# Altium footprint library Amin-Library.PcbLib: 601 footprints (part 24 of 38)
Each footprint in its own frame and in the unit in brackets; x right, y up, seen from the top. Pads: shape width x height; smd on the part's side, far side on the other; paste and mask are expansions set on the pad; w line width, h text height; cw(c..) or ccw(c..) is an arc to the next point about the centre after c.
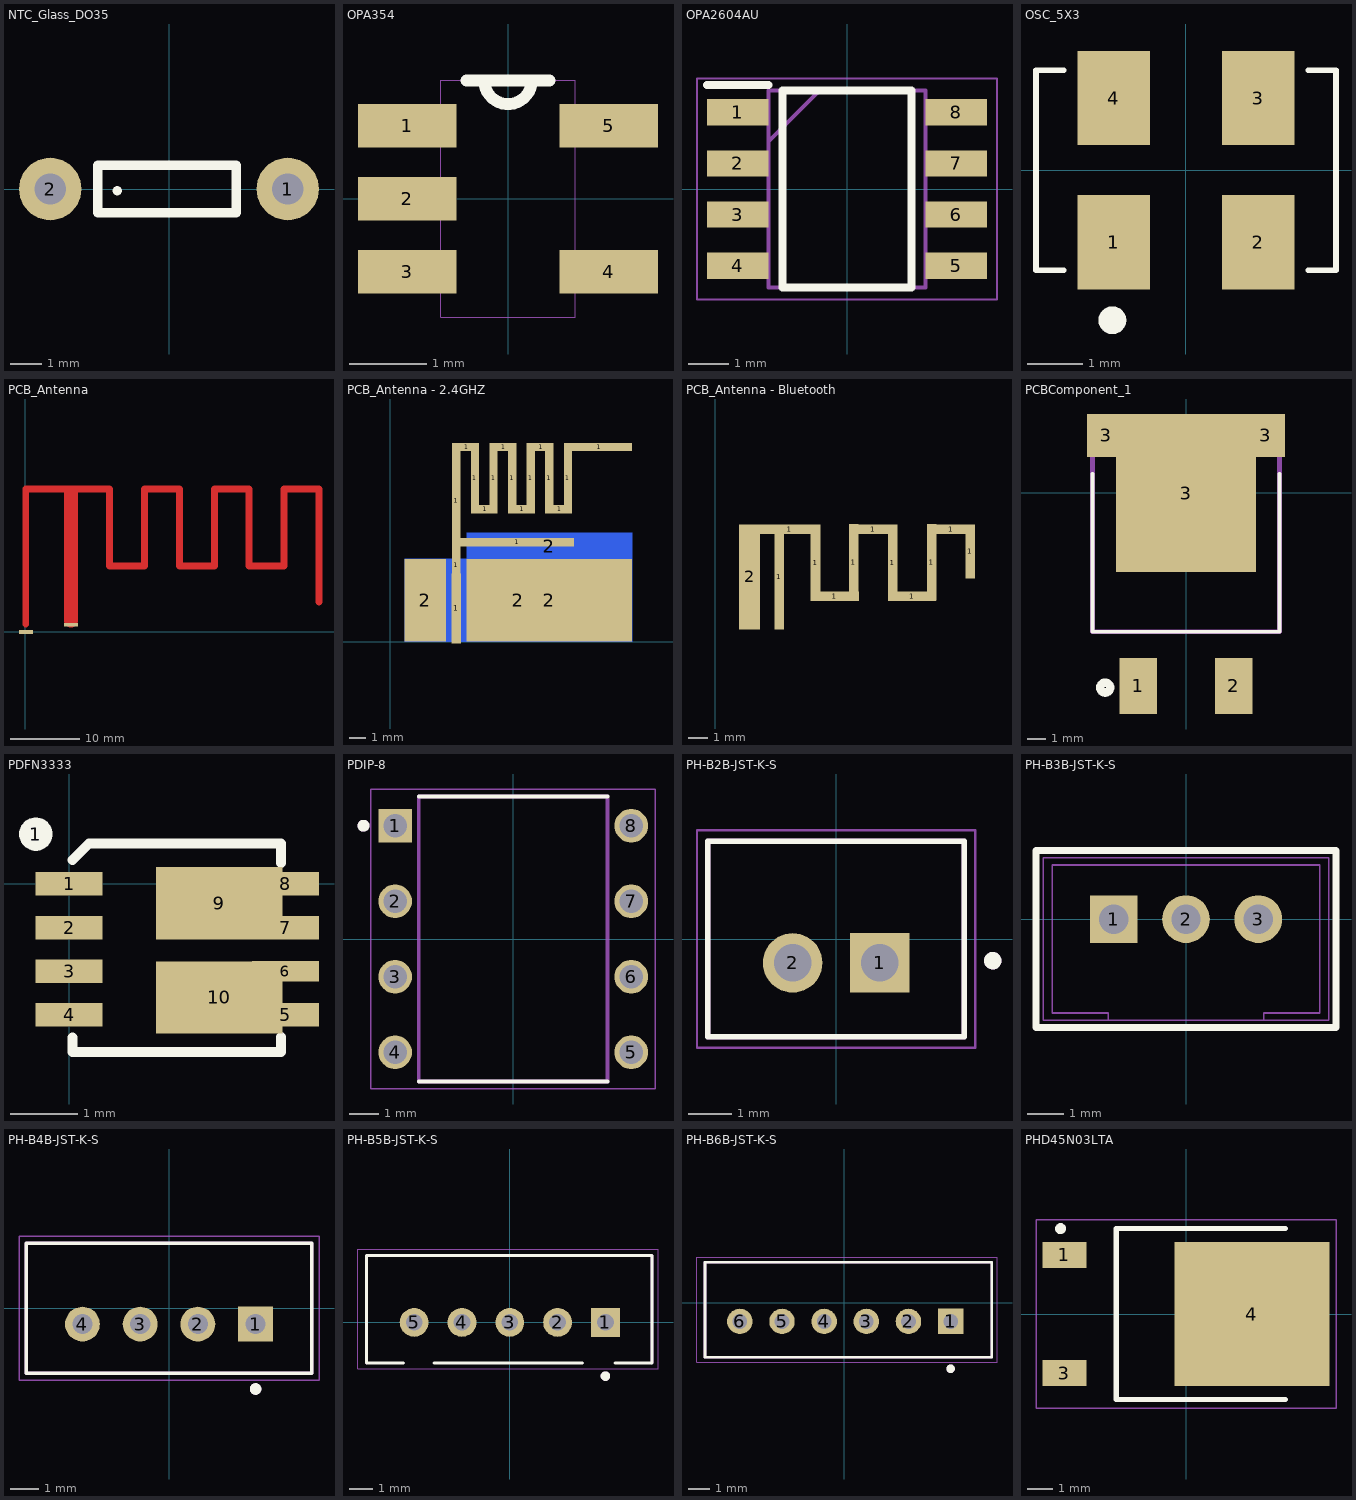
[diagram p23: the footprints below, top view; thin cyan lines are the x and y axes]

## NTC_Glass_DO35 [mm]
pads (2):
  round 2 hole 1: 1(3.8,0) 2(-3.8,0)
Top Overlay:
  lines w0.305: -2.286,-0.762 2.159,-0.762 2.159,0.762 -2.286,0.762 -2.286,-0.762 ; -1.651,-0.063 -1.651,-0.063
3D body "User Library-DO-35_300mils.STEP": height 2.46, standoff -2, extent -4.07,-1.016 4.07,0.89

## OPA354 [mil]
pads (5):
  rect 50x22 smd: 1(-51,37) 2(-51,0) 3(-51,-37) 4(51,-37) 5(51,37)
Top Overlay:
  lines w6: -21,60 -12,60 ; 21,60 12,60 ; -12,60 ccw(c0,60) 12,60 ; -12,60 12,60
Mechanical 4:
  lines w0: -59,-47 -34,-47 ; -59,-47 -59,-28 ; -59,-47 -34,-47 ; -59,-47 -59,-28 ; -59,-28 -34,-28 ; -59,-28 -34,-28 ; -59,-10 -34,-10 ; -59,-10 -59,10 ; -59,-10 -34,-10 ; -59,-10 -59,10 ; -59,10 -34,10 ; -59,10 -34,10 ; -59,28 -34,28 ; -59,28 -59,47 ; -59,28 -34,28 ; -59,28 -59,47 ; -59,47 -34,47 ; -59,47 -34,47 ; -34,-60 -34,-47 ; -34,-60 34,-60 ; -34,-60 -34,-47 ; -34,-60 34,-60 ; -34,-47 -34,-28 ; -34,-47 -34,-28 ; -34,-28 -34,-10 ; -34,-28 -34,-10 ; -34,-10 -34,10 ; -34,-10 -34,10 ; -34,10 -34,28 ; -34,10 -34,28 ; -34,28 -34,47 ; -34,28 -34,47 ; -34,47 -34,60 ; -34,47 -34,60 ; -34,60 -12,60 ; -34,60 -12,60 ; -12,60 ccw(c0,60) 12,60 ; -12,60 ccw(c0,60) 12,60 ; -12,60 12,60 ; -12,60 12,60 ; 12,60 34,60 ; 12,60 34,60 ; 34,-60 34,-47 ; 34,-60 34,-47 ; 34,-47 59,-47 ; 34,-47 34,-28 ; 34,-47 59,-47 ; 34,-47 34,-28 ; 34,-28 59,-28 ; 34,-28 34,28 ; 34,-28 59,-28 ; 34,-28 34,28 ; 34,28 59,28 ; 34,28 34,47 ; 34,28 59,28 ; 34,28 34,47 ; 34,47 59,47 ; 34,47 34,60 ; 34,47 59,47 ; 34,47 34,60 ; 59,-47 59,-28 ; 59,-47 59,-28 ; 59,28 59,47 ; 59,28 59,47
3D body "TPS73225DBVR--3DModel-STEP-56544.STEP": height 56.12, standoff -1.01, extent -55.13,-57.1 55.12,57.08

## OPA2604AU [mm]
pads (8):
  rect 1.525x0.65 smd: 1(-2.712,1.905) 2(-2.712,0.635) 3(-2.712,-0.635) 4(-2.712,-1.905) 5(2.712,-1.905) 6(2.712,-0.635) 7(2.712,0.635) 8(2.712,1.905)
Top Overlay:
  lines w0.2: -3.475,2.58 -1.95,2.58 ; -1.6,-2.45 1.6,-2.45 1.6,2.45 -1.6,2.45 -1.6,-2.45
Mechanical 13:
  lines w0.1: -1.95,1.18 -0.68,2.45 ; -1.95,-2.45 1.95,-2.45 1.95,2.45 -1.95,2.45 -1.95,-2.45
Mechanical 15:
  lines w0.05: -3.725,-2.75 3.725,-2.75 3.725,2.75 -3.725,2.75 -3.725,-2.75
3D body "FR9886SOGTR.stp": height 1.75, standoff 0, extent -3,-2.45 3,2.45

## OSC_5X3 [mm]
pads (4):
  rect 1.3x1.7 smd mask+0.15: 1(-1.3,-1.3) 2(1.3,-1.3) 3(1.3,1.3) 4(-1.3,1.3)
Top Overlay:
  circle w0.25: c-1.325,-2.7 r0.125
  lines w0.1: -2.2,-1.8 -2.7,-1.8 -2.7,1.8 -2.2,1.8 ; 2.2,-1.8 2.7,-1.8 2.7,1.8 2.2,1.8
3D body: height 1.4, standoff 0, extent -2.575,-1.675 2.575,1.675

## PCB_Antenna [mil]
pads (2):
  rect 78x21 smd: 1(260,40) 2(5,0)
Top Layer:
  lines w39.37: 4.09,45 4.09,805.61 263.62,805.61 476.54,805.61 476.54,372.54 673.39,372.54 673.39,805.61 870.24,805.61 870.24,372.54 1067.09,372.54 1067.09,805.61 1263.94,805.61 1263.94,372.54 1460.79,372.54 1460.79,805.61 1657.64,805.61 1657.64,170
  lines w78.74: 260,65 260,781.79

## PCB_Antenna - 2.4GHZ [mil]
pads (21):
  rect 24x170 smd paste+0 mask+0: 1(160,80)
  rect 20x45 smd paste+0 mask+0: 1(160,185)
  rect 20x280 smd paste+0 mask+0: 1(160,340)
  rect 60x20 smd paste+0 mask+0: 1(185,470) 1(230,320) 1(275,470) 1(320,320) 1(365,470) 1(410,320)
  rect 20x170 smd paste+0 mask+0: 1(205,395) 1(250,395) 1(295,395) 1(340,395) 1(385,395) 1(430,395)
  rect 274x20 smd paste+0 mask+0: 1(307,240)
  rect 160x20 smd paste+0 mask+0: 1(505,470)
  rect 100x200 smd paste+0 mask+0: 2(85,100)
  rect 550x200 smd far side paste+0 mask+0: 2(310,100)
  rect 400x200 smd paste+0 mask+0: 2(385,100)
  rect 400x65 smd far side paste+0 mask+0: 2(385,230)

## PCB_Antenna - Bluetooth [mm]
pads (12):
  rect 0.5x5.5 smd paste+0 mask+0: 1(3.35,8)
  rect 3.2x0.5 smd paste+0 mask+0: 1(3.9,10.5)
  rect 0.5x4 smd paste+0 mask+0: 1(5.24,8.75) 1(7.239,8.763) 1(9.271,8.75) 1(11.303,8.763)
  rect 2.5x0.5 smd paste+0 mask+0: 1(6.25,7) 1(8.255,10.5) 1(10.287,6.985) 1(12.319,10.5)
  rect 0.5x2.8 smd paste+0 mask+0: 1(13.32,9.33)
  rect 1.1x5.5 smd paste+0 mask+0: 2(1.8,8)

## PCBComponent_1 [mm]
height 9.45
pads (5):
  rect 2x3 smd: 1(-2.54,-10.325) 2(2.54,-10.325)
  rect 2.032x2.286 smd paste-2: 3(-4.267,3.06) 3(4.267,3.06)
  rect 7.5x8.45 smd paste-5: 3(0,-0.025)
Top Overlay:
  circle w0.45: c-4.318,-10.414 r0.266
  lines w0.2: -5,1 -5,-7.425 5,-7.425 5,1
Top Paste:
  rectangle: 0.5,0.5 3.75,4.1
  rectangle: 0.5,-4 3.75,-0.5
  rectangle: -3.75,-4 -0.5,-0.5
  rectangle: -3.75,0.5 -0.5,4.1
Mechanical 13:
  lines w0.254: -5,-7.425 -5,2.175 5,2.175 5,-7.425 -5,-7.425

## PDFN3333 [mm]
height 2.65
pads (11):
  round 0.5 on Top Overlay: 1(-0.495,0.74)
  rect 1x0.35 smd: 1(0,0) 2(0,-0.65) 3(0,-1.3) 4(0,-1.95) 5(3.216,-1.95) 7(3.216,-0.65) 8(3.216,0)
  rect 1x0.3 smd: 6(3.216,-1.3)
  rect 1.88x1.075 smd: 9(2.232,-0.29) 10(2.232,-1.69)
Top Overlay:
  lines w0.15: 0.052,-2.5 3.152,-2.5 ; 0.052,0.355 0.297,0.6 3.152,0.6 3.152,0.31
  lines w0.152: 0.052,-2.5 0.052,-2.29 ; 3.152,-2.5 3.152,-2.28

## PDIP-8 [mm]
pads (8):
  rect 1.13x1.13 hole 0.78: 1(-3.97,3.81)
  round 1.13 hole 0.78: 2(-3.97,1.27) 3(-3.97,-1.27) 4(-3.97,-3.81) 5(3.97,-3.81) 6(3.97,-1.27) 7(3.97,1.27) 8(3.97,3.81)
Top Overlay:
  circle w0.2: c-5.035,3.81 r0.1
  lines w0.127: -3.175,-4.795 3.175,-4.795 ; -3.175,4.795 3.175,4.795
Mechanical 13:
  circle w0.2: c-5.035,3.81 r0.1
  lines w0.127: -3.175,-4.795 3.175,-4.795 3.175,4.795 -3.175,4.795 -3.175,-4.795
Mechanical 15:
  lines w0.05: -4.785,-5.045 4.785,-5.045 4.785,5.045 -4.785,5.045 -4.785,-5.045
3D body "step_temp.STEP": height 5.08, standoff -3.17, extent -5.461,-4.794 5.461,4.794

## PH-B2B-JST-K-S [mm]
pads (2):
  rect 1.368x1.368 hole 0.86: 1(1,-0.55)
  round 1.368 hole 0.86: 2(-1,-0.55)
Top Overlay:
  circle w0.2: c3.6,-0.5 r0.1
  lines w0.127: -2.95,-2.25 2.95,-2.25 2.95,2.25 -2.95,2.25 -2.95,-2.25
Mechanical 13:
  circle w0.2: c3.6,-0.5 r0.1
  lines w0.127: -2.95,-2.25 -2.95,2.25 2.95,2.25 2.95,-2.25 -2.95,-2.25
Mechanical 15:
  lines w0.05: -3.2,-2.5 -3.2,2.5 3.2,2.5 3.2,-2.5 -3.2,-2.5
3D body "User Library-b2b-ph-ks-1.step": height 6.01, standoff -2.99, extent -2.95,-2.25 2.95,2.25

## PH-B3B-JST-K-S [mil]
pads (3):
  rect 52x52 hole 32: 1(-78.74,0)
  round 52 hole 32: 2(0,0) 3(78.74,0)
Top Overlay:
  lines w8: -163.39,-118.11 163.39,-118.11 163.39,74.8 -163.39,74.8 -163.39,-118.11
Mechanical 13:
  lines w2: -84.65,-110.24 84.65,-110.24 ; -84.65,-110.24 -155.51,-110.24 -155.51,66.93 155.51,66.93 155.51,-110.24 84.65,-110.24 ; -84.65,-110.24 -84.65,-102.36 -145.67,-102.36 -145.67,59.06 145.67,59.06 145.67,-102.36 84.65,-102.36 84.65,-110.24
3D body "step_temp.STEP": height 236.22, standoff -133.86, extent -155.51,-113.58 155.51,63.59

## PH-B4B-JST-K-S [mm]
pads (4):
  rect 1.208x1.208 hole 0.7: 1(3,-0.55)
  round 1.208 hole 0.7: 2(1,-0.55) 3(-1,-0.55) 4(-3,-0.55)
Top Overlay:
  circle w0.2: c3,-2.8 r0.1
  lines w0.127: -4.95,-2.25 -4.95,2.25 4.95,2.25 4.95,-2.25 -4.95,-2.25
Mechanical 13:
  circle w0.2: c3,-2.8 r0.1
  lines w0.127: -4.95,-2.25 4.95,-2.25 4.95,2.25 -4.95,2.25 -4.95,-2.25
Mechanical 15:
  lines w0.05: -5.2,-2.5 5.2,-2.5 5.2,2.5 -5.2,2.5 -5.2,-2.5
3D body "User Library-b4b-ph-k-s.step": height 6.01, standoff -2.99, extent -4.95,-2.25 4.95,2.25

## PH-B5B-JST-K-S [mm]
pads (5):
  rect 1.208x1.208 hole 0.7: 1(4,0)
  round 1.208 hole 0.7: 2(2,0) 3(0,0) 4(-2,0) 5(-4,0)
Top Overlay:
  circle w0.2: c4,-2.25 r0.1
  lines w0.127: -4.445,-1.7 -6,-1.7 -6,2.8 5.95,2.8 5.95,-1.7 4.395,-1.7 ; -3.175,-1.7 3.048,-1.7
Mechanical 13:
  circle w0.2: c4,-2.25 r0.1
  lines w0.127: -6,-1.7 -6,2.8 5.95,2.8 5.95,-1.7
Mechanical 15:
  lines w0.05: -6.35,-1.95 6.2,-1.95 6.2,3.05 -6.35,3.05 -6.35,-1.95
3D body "x2016wv-05-46sn.stp": height 6.1, standoff -3.4, extent -6,-1.8 6,2.9

## PH-B6B-JST-K-S [mil]
pads (6):
  rect 47.56x47.56 hole 27.56: 1(198.74,-35)
  round 47.56 hole 27.56: 2(120,-35) 3(41.26,-35) 4(-37.48,-35) 5(-116.22,-35) 6(-194.96,-35)
Top Overlay:
  circle w7.87: c198.74,-123.58 r3.94
  lines w5: -260,-101.93 -260,75.24 275.51,75.24 275.51,-101.93 -260,-101.93
Mechanical 13:
  circle w7.87: c198.74,-123.58 r3.94
  lines w5: -260,-101.93 275.51,-101.93 275.51,75.24 -260,75.24 -260,-101.93
Mechanical 15:
  lines w1.97: -275,-111.77 285.35,-111.77 285.35,85.08 -275,85.08 -275,-111.77
3D body "User Library-b6b-ph-ks.step": height 236.72, standoff -117.61, extent -271.65,-101.57 275.59,75.59

## PHD45N03LTA [mm] "TO-252-3"
height 22
pads (3):
  rect 1.7x1 smd: 1(-4.7,2.285) 3(-4.7,-2.285)
  rect 6x5.55 smd paste-4: 4(2.55,0)
Top Overlay:
  circle w0.2: c-4.85,3.3 r0.112
  lines w0.2: 3.85,-3.3 -2.7,-3.3 -2.7,3.3 3.85,3.3
Top Paste:
  region: 1.97,-2.11 0.03,-2.11 0.03,-0.39 1.97,-0.39
  region: 4.47,-2.114 2.534,-2.114 2.534,-0.39 4.47,-0.39
  region: 4.47,0.39 2.532,0.39 2.532,2.11 4.47,2.11
  region: 1.97,0.39 0.03,0.39 0.03,2.11 1.97,2.11
Mechanical 15:
  lines w0.05: -5.8,-3.65 -5.8,3.65 5.8,3.65 5.8,-3.65 -5.8,-3.65
3D body "User Library-TO-252-3.step": height 2.42, standoff 0.01, extent -5.24,-3.35 5.112,3.35